# Altium schematic symbol library CAP_Y_Y1.SchLib: 1 symbol
Pins are listed as number, name and electrical type; pins without a type are passive.

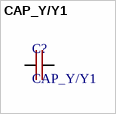
[diagram p0: symbol CAP_Y/Y1]

## CAP_Y/Y1
designator C?
footprint FP-DE1_D8_T6_F10_d0_6-0_0-MFG
footprint FP-DE2_D6_T4_F7_5_d0_6-0-MFG
footprint CD45-E2GA222M-VKA
footprint CAP-V
footprint AKMJ-P (BM AKMJ-P 2.2UF 350VAC)
footprint MKP63_300~Y2_472
footprint B81123C1222M
pins: 1, 2